# Altium footprint library LED.PcbLib: 56 footprints (part 4 of 4)
Each footprint in its own frame and in the unit in brackets; x right, y up, seen from the top. Pads: shape width x height; smd on the part's side, far side on the other; paste and mask are expansions set on the pad; w line width, h text height; cw(c..) or ccw(c..) is an arc to the next point about the centre after c.
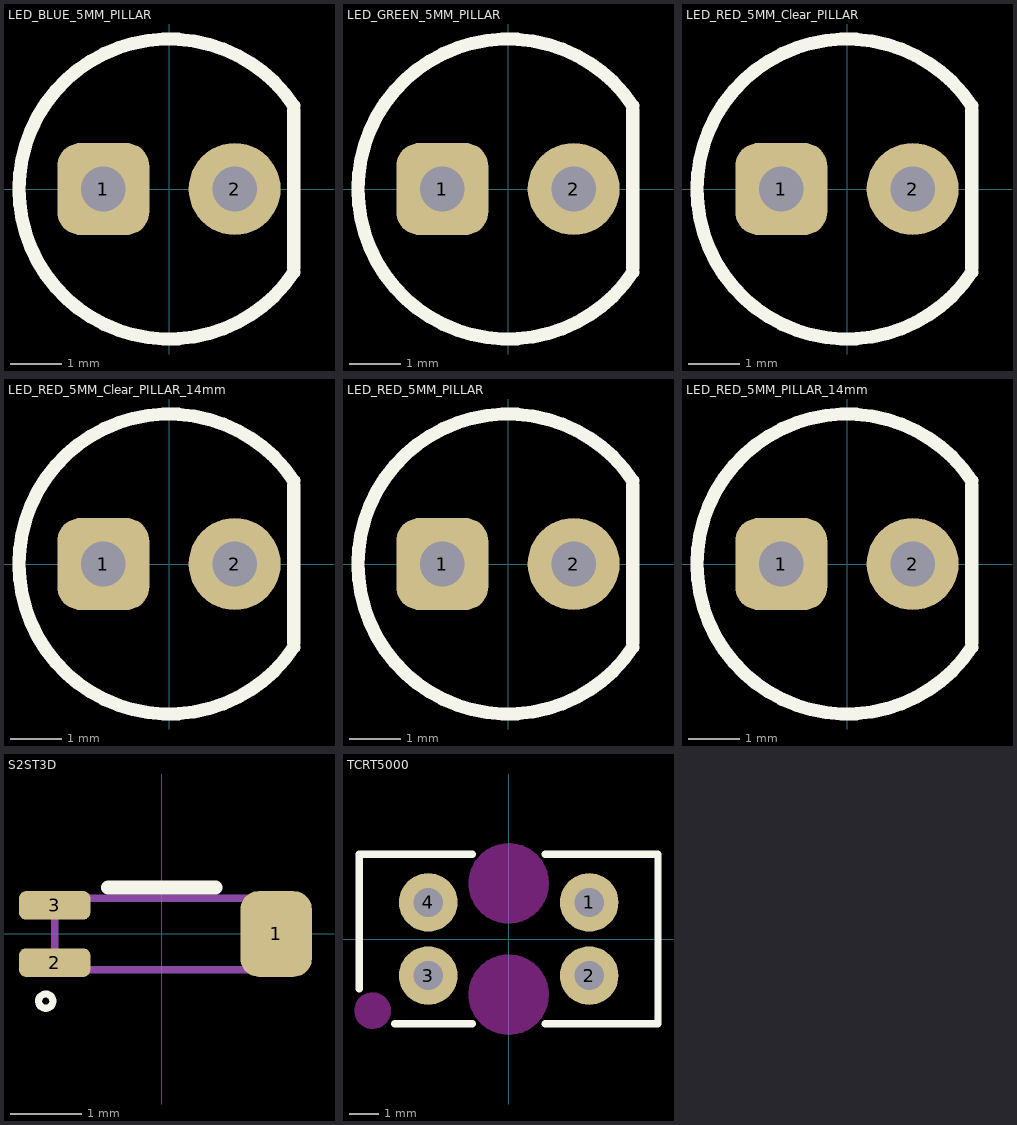
[diagram p3: the footprints below, top view; thin cyan lines are the x and y axes]

## LED_BLUE_5MM_PILLAR [mil] "PILLAR 16mm"
pads (2):
  rrect50% 70x70 hole 34: 1(-50,0)
  round 70 hole 34: 2(50,0)
Top Overlay:
  lines w10: 95,-63.33 cw(c0,0) 95,63.33 ; 95,-60 95,60
Top Designator:
  text ".Designator" at -155.66,-13.54 h60
3D body: height 629.92, standoff 20, extent -107.06,-98.43 89.8,98.42
3D body: height 20, standoff -78.74, extent -65.75,-15.75 -34.25,15.75
3D body: height 20, standoff -78.74, extent 34.25,-15.75 65.75,15.75
3D body "LED D5 - Blue_cutted.step": height 968.5, standoff 429.13, extent -115.69,-115.96 98.42,115.95

## LED_GREEN_5MM_PILLAR [mil] "PILLAR 16mm"
pads (2):
  rrect50% 70x70 hole 34: 1(-50,0)
  round 70 hole 34: 2(50,0)
Top Overlay:
  lines w10: 95,-63.33 cw(c0,0) 95,63.33 ; 95,-60 95,60
Top Designator:
  text ".Designator" at -155.66,-13.54 h60
3D body "LED 5mm Green.step": height 973.43, standoff 512.8, extent -112.71,-114.07 99.43,114.08
3D body: height 20, standoff -78.74, extent 34.25,-15.75 65.75,15.75
3D body: height 20, standoff -78.74, extent -65.75,-15.75 -34.25,15.75
3D body: height 629.92, standoff 20, extent -107.06,-98.43 89.8,98.42

## LED_RED_5MM_Clear_PILLAR [mil] "PILLAR 16mm"
pads (2):
  rrect50% 70x70 hole 34: 1(-50,0)
  round 70 hole 34: 2(50,0)
Top Overlay:
  lines w10: 95,-63.33 cw(c0,0) 95,63.33 ; 95,-60 95,60
Top Designator:
  text ".Designator" at -155.66,-13.54 h60
3D body: height 629.92, standoff 20, extent -107.06,-98.43 89.8,98.42
3D body: height 20, standoff -78.74, extent -65.75,-15.75 -34.25,15.75
3D body: height 20, standoff -78.74, extent 34.25,-15.75 65.75,15.75
3D body "LED D5 - White-Clear_cutted.x_t": height 968.5, standoff 429.13, extent -115.68,-115.96 98.42,115.95

## LED_RED_5MM_Clear_PILLAR_14mm [mil] "PILLAR 14mm"
pads (2):
  rrect50% 70x70 hole 34: 1(-50,0)
  round 70 hole 34: 2(50,0)
Top Overlay:
  lines w10: 95,-63.33 cw(c0,0) 95,63.33 ; 95,-60 95,60
Top Designator:
  text ".Designator" at -155.66,-13.54 h60
3D body "LED D5 - White-Clear_cutted.x_t": height 889.76, standoff 350.39, extent -115.68,-115.96 98.42,115.95
3D body: height 20, standoff -78.74, extent 34.25,-15.75 65.75,15.75
3D body: height 20, standoff -78.74, extent -65.75,-15.75 -34.25,15.75
3D body: height 551.18, standoff 20, extent -107.06,-98.43 89.8,98.42

## LED_RED_5MM_PILLAR [mil] "PILLAR 16mm"
pads (2):
  rrect50% 70x70 hole 34: 1(-50,0)
  round 70 hole 34: 2(50,0)
Top Overlay:
  lines w10: 95,-63.33 cw(c0,0) 95,63.33 ; 95,-60 95,60
Top Designator:
  text ".Designator" at -155.66,-13.54 h60
3D body: height 629.92, standoff 20, extent -107.06,-98.43 89.8,98.42
3D body: height 20, standoff -78.74, extent -65.75,-15.75 -34.25,15.75
3D body: height 20, standoff -78.74, extent 34.25,-15.75 65.75,15.75
3D body "LED D5 - Red_cutted.step": height 968.5, standoff 429.13, extent -115.68,-115.96 98.42,115.95

## LED_RED_5MM_PILLAR_14mm [mil] "PILLAR 14mm"
pads (2):
  rrect50% 70x70 hole 34: 1(-50,0)
  round 70 hole 34: 2(50,0)
Top Overlay:
  lines w10: 95,-63.33 cw(c0,0) 95,63.33 ; 95,-60 95,60
Top Designator:
  text ".Designator" at -155.66,-13.54 h60
3D body: height 551.18, standoff 20, extent -107.06,-98.43 89.8,98.42
3D body: height 20, standoff -78.74, extent -65.75,-15.75 -34.25,15.75
3D body: height 20, standoff -78.74, extent 34.25,-15.75 65.75,15.75
3D body "LED D5 - Red_cutted.step": height 889.76, standoff 350.39, extent -115.68,-115.96 98.42,115.95

## S2ST3D [mm] "LED S2ST3D 3.2mmX1.0mm"
height 2.8
pads (3):
  rrect50% 1x1.2 smd mask+0.075: 1(1.6,0)
  rrect50% 1x0.4 smd mask+0.075: 2(-1.5,-0.4) 3(-1.5,0.4)
Top Overlay:
  lines w0.1: -1.526,-0.952 cw(c-1.626,-0.941) -1.526,-0.941
  lines w0.2: -0.75,0.65 0.75,0.65
Top Designator:
  text ".Designator" at -3.66,-0.514 h1.52
Mechanical 13:
  lines w0.1: -1.5,-0.5 -1.5,0.5 1.5,0.5 1.5,-0.5 -1.5,-0.5
3D body "LED3210.step": height 1.49, standoff -0.01, extent -1.6,-0.5 1.6,0.5

## TCRT5000 [mm]
pads (4):
  round 2 hole 1: 1(2.75,1.25) 2(2.75,-1.25) 3(-2.75,-1.25) 4(-2.75,1.25)
Top Overlay:
  lines w0.254: -5.1,-1.7 -5.1,2.9 -1.25,2.9 ; -3.9,-2.9 -1.25,-2.9 ; 1.25,-2.9 5.1,-2.9 5.1,2.9 1.25,2.9
Keep-Out Layer:
  board cut-out: -4.65,-2.95 -4.749,-2.95 -4.933,-2.874 -5.074,-2.733 -5.15,-2.549 -5.15,-2.45 -5.15,-2.351 -5.074,-2.167 -4.933,-2.026 -4.749,-1.95 -4.65,-1.95 -4.551,-1.95 -4.367,-2.026 -4.226,-2.167 -4.15,-2.351 -4.15,-2.45 -4.15,-2.549 -4.226,-2.733 -4.367,-2.874 -4.551,-2.95
  board cut-out: -1.25,-1.9 -1.25,-2.023 -1.202,-2.265 -1.108,-2.492 -0.971,-2.697 -0.797,-2.871 -0.592,-3.008 -0.365,-3.102 -0.123,-3.15 0,-3.15 0.123,-3.15 0.365,-3.102 0.592,-3.008 0.797,-2.871 0.971,-2.697 1.108,-2.492 1.202,-2.265 1.25,-2.023 1.25,-1.9 1.25,-1.777 1.202,-1.535 1.108,-1.308 0.971,-1.103 0.797,-0.929 0.592,-0.792 0.365,-0.698 0.123,-0.65 0,-0.65 -0.123,-0.65 -0.365,-0.698 -0.592,-0.792 -0.797,-0.929 -0.971,-1.103 -1.108,-1.308 -1.202,-1.535 -1.25,-1.777
  board cut-out: 0,0.65 -0.123,0.65 -0.365,0.698 -0.592,0.792 -0.797,0.929 -0.971,1.103 -1.108,1.308 -1.202,1.535 -1.25,1.777 -1.25,1.9 -1.25,2.023 -1.202,2.265 -1.108,2.492 -0.971,2.697 -0.797,2.871 -0.592,3.008 -0.365,3.102 -0.123,3.15 0,3.15 0.123,3.15 0.365,3.102 0.592,3.008 0.797,2.871 0.971,2.697 1.108,2.492 1.202,2.265 1.25,2.023 1.25,1.9 1.25,1.777 1.202,1.535 1.108,1.308 0.971,1.103 0.797,0.929 0.592,0.792 0.365,0.698 0.123,0.65
Keep-Out Layer:
  circle w0.254: c-4.65,-2.45 r0.5
  circle w0.254: c0,1.9 r1.25
  circle w0.254: c0,-1.9 r1.25
Top Designator:
  text ".Designator" at -3.735,-0.344 h1.52
3D body "TCRT5000.stp": height 7.12, standoff -3.4, extent -5.1,-3.5 5.1,3.5